# Altium footprint library Resistencias.PcbLib: 28 footprints (part 2 of 2)
Each footprint in its own frame and in the unit in brackets; x right, y up, seen from the top. Pads: shape width x height; smd on the part's side, far side on the other; paste and mask are expansions set on the pad; w line width, h text height; cw(c..) or ccw(c..) is an arc to the next point about the centre after c.
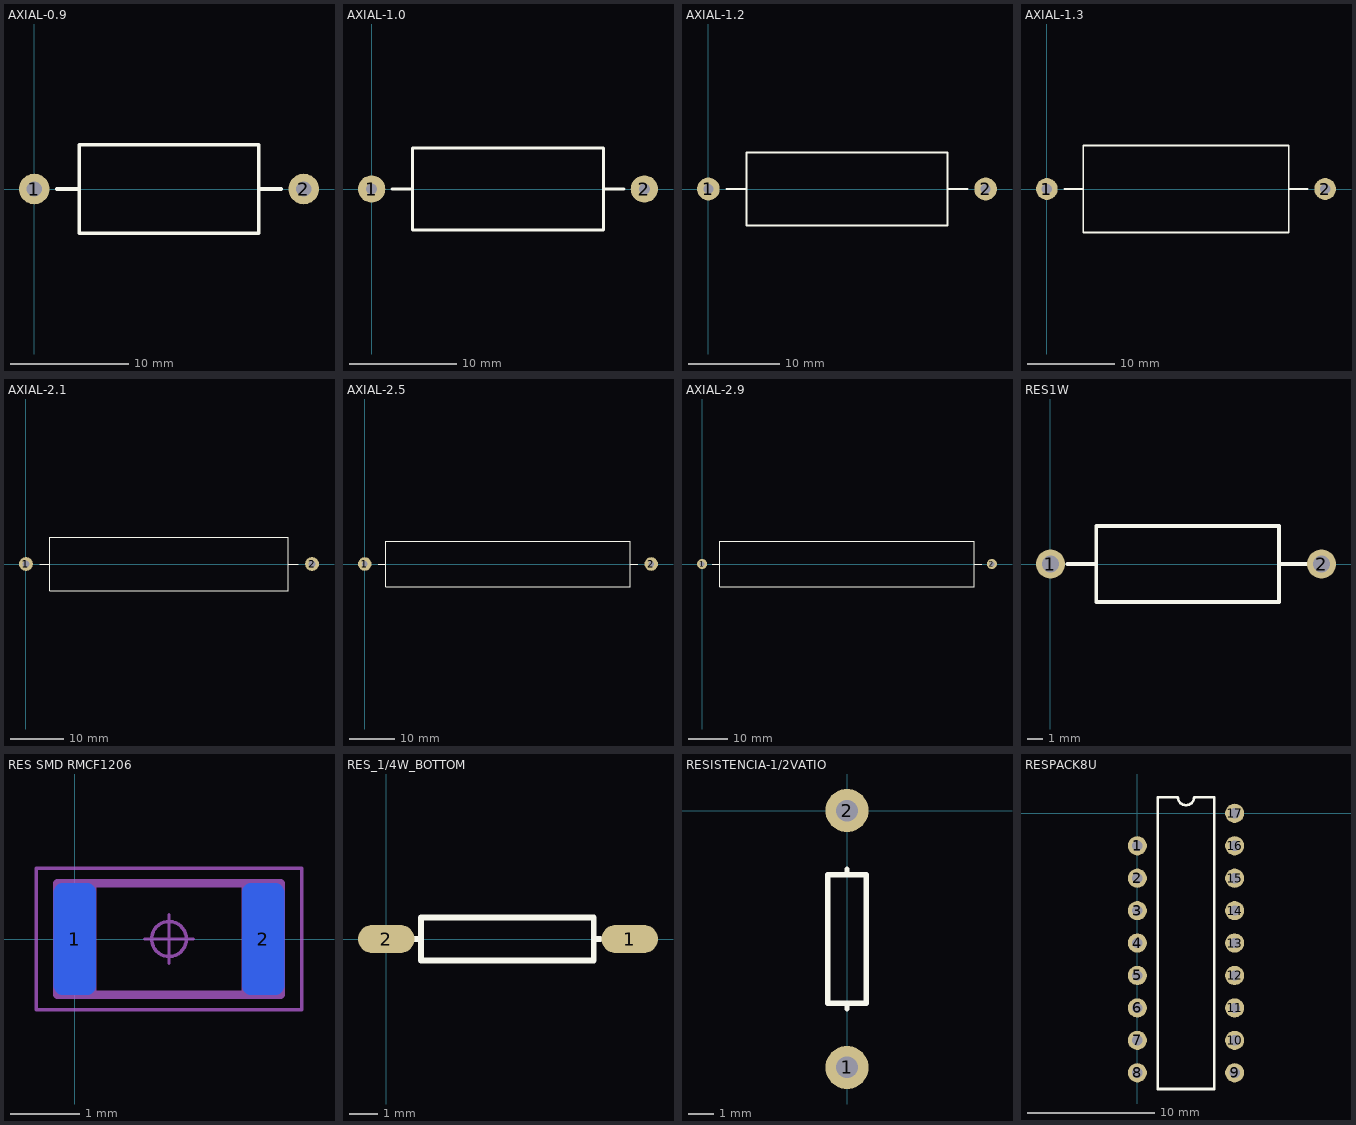
[diagram p1: the footprints below, top view; thin cyan lines are the x and y axes]

## AXIAL-0.9 [mm]
pads (2):
  round 2.6 hole 1.3: 1(0,0) 2(22.86,0)
Top Overlay:
  lines w0.305: 1.905,0 3.81,0 ; 19.05,0 20.955,0 ; 3.81,-3.75 3.81,3.75 19.05,3.75 19.05,-3.75 3.81,-3.75

## AXIAL-1.0 [mil]
pads (2):
  round 100 hole 40: 1(0,0) 2(1000,0)
Top Overlay:
  lines w12: 75,0 150,0 ; 850,0 925,0 ; 150,-150 850,-150 850,150 150,150 150,-150

## AXIAL-1.2 [mm]
pads (2):
  round 2.5 hole 1.1: 1(0,0) 2(30.48,0)
Top Overlay:
  lines w0.2: 2,0 4.175,0 ; 26.305,0 28.48,0 ; 4.175,0 4.175,4 26.305,4 26.305,-4 4.175,-4 4.175,0

## AXIAL-1.3 [mm]
pads (2):
  round 2.5 hole 1.2: 1(0,0) 2(32,0)
Top Overlay:
  lines w0.2: 2,0 4.175,0 ; 27.825,0 30,0 ; 4.175,0 4.175,5 27.825,5 27.825,-5 4.175,-5 4.175,0

## AXIAL-2.1 [mm]
pads (2):
  round 2.6 hole 1.3: 1(0,0) 2(53.34,0)
Top Overlay:
  lines w0.2: 2.6,0 4.475,0 ; 48.865,0 50.74,0 ; 4.475,0 4.475,-5 48.865,-5 48.865,5 4.475,5 4.475,0

## AXIAL-2.5 [mm]
pads (2):
  round 3 hole 1.3: 1(0,0) 2(63.5,0)
Top Overlay:
  lines w0.2: 3,0 4.675,0 ; 58.825,0 60.5,0 ; 4.675,0 4.675,5 58.825,5 58.825,-5 4.675,-5 4.675,0

## AXIAL-2.9 [mm]
pads (2):
  round 2.6 hole 1.3: 1(0,0) 2(73.66,0)
Top Overlay:
  lines w0.2: 2.6,0 4.475,0 ; 69.185,0 71.06,0 ; 4.475,0 4.475,-5.75 69.185,-5.75 69.185,5.75 4.475,5.75 4.475,0

## RES1W [mm]
pads (2):
  round 1.9 hole 1.1: 1(0,0) 2(17.78,0)
Top Overlay:
  lines w0.254: 1.1,0 3,0 ; 15,0 16.8,0 ; 3,0 3,-2.5 15,-2.5 15,2.5 3,2.5 3,0

## RES SMD RMCF1206 [mm]
pads (2):
  rrect43% 0.6x1.6 smd far side: 1(0,0) 2(2.7,0)
Bottom Overlay:
  lines w0.12: -0.301,-0.889 3.001,-0.889 ; -0.301,0.889 3.001,0.889
Mechanical 13:
  lines w0.12: 0.25,-0.8 0.25,0.8 ; 2.45,-0.8 2.45,0.8 ; -0.25,-0.8 2.95,-0.8 2.95,0.8 -0.25,0.8 -0.25,-0.8
Mechanical 15:
  circle w0.05: c1.35,0 r0.25
  lines w0.05: 1,0 1.7,0 ; 1.35,-0.35 1.35,0.35 ; -0.555,-1.016 -0.555,1.016 3.255,1.016 3.255,-1.016 -0.555,-1.016
3D body: height 0.56, standoff 0, extent -0.249,-0.799 0.249,0.799
3D body: height 0.56, standoff 0, extent 2.451,-0.799 2.949,0.799
3D body: height 0.55, standoff 0, extent 0.251,-0.799 2.449,0.799

## RES_1/4W_BOTTOM [mm] "Axial Device, Thru-Hole; 2 Leads; 0.3 in Pin Spacing"
height 1.524
pads (2):
  oval 2x1 smd: 1(8.62,0) 2(0,0)
Top Overlay:
  lines w0.2: 1,0 1.229,0 ; 7.35,0 7.579,0 ; 1.229,0 1.229,-0.762 2,-0.762 7.35,-0.762 7.35,0.762 1.508,0.762 1.229,0.762 1.229,0

## RESISTENCIA-1/2VATIO [mm]
pads (2):
  round 1.7 hole 0.85: 1(0,-10.16) 2(0,0)
Top Overlay:
  lines w0.2: 0,-7.849 0,-7.62 ; 0,-2.311 0,-2.54 ; 0,-2.54 -0.762,-2.54 -0.762,-7.62 0.762,-7.62 0.762,-2.54 0,-2.54

## RESPACK8U [mm]
pads (17):
  round 1.5 hole 0.8: 1(0,-2.54) 2(0,-5.08) 3(0,-7.62) 4(0,-10.16) 5(0,-12.7) 6(0,-15.24) 7(0,-17.78) 8(0,-20.32) 9(7.62,-20.32) 10(7.62,-17.78) 11(7.62,-15.24) 12(7.62,-12.7) 13(7.62,-10.16) 14(7.62,-7.62) 15(7.62,-5.08) 16(7.62,-2.54) 17(7.62,0)
Top Overlay:
  lines w0.2: 1.585,-21.59 1.585,1.27 3.175,1.27 ccw(c3.81,1.27) 4.445,1.27 6.035,1.27 6.035,-21.59 1.585,-21.59